# EAGLE library part PCIE-036-02-F-D-TH (library madhu)
Check availability <https://pricing.snapeda.com/parts/PCIE03602FDTH/Samtec/view-part?ref=eda>
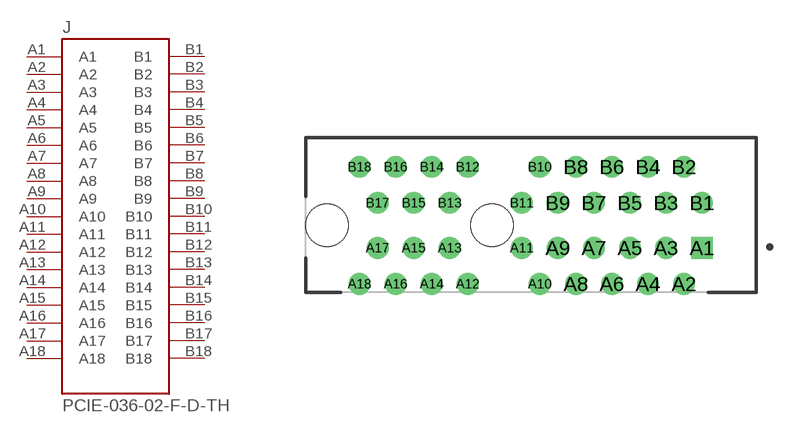
[diagram p51: symbol with the pads of SAMTEC_PCIE-036-02-F-D-TH; footprint SAMTEC_PCIE-036-02-F-D-TH]

Designator prefix J

## PCIE-036-02-F-D-TH (AVAILABILITY: In Stock; CHECK_PRICES: https://www.snapeda.com/parts/PCIE03602FDTH/Samtec/view-part/?ref=eda; DESCRIPTION: CARD EDGE CONN, DUAL SIDE, 36POS, TH; Product Range:PCIE Series; No. of Contacts:36Contacts; Card Edge / Backplane Connector Type:Card Edge; Pitch Spacing:1mm; Gender:Receptacle; Contact Termination Type:Through Hole; No. of Rows:2Rows; Row Pitch:-; Contact Material:Phosphor Bronze; Contact Plating:Gold Plated Contacts; SVHC:No SVHC (15-Jan-2018); Connector Type:Card Edge; Contact Termination:Through Hole Vertical; Lead Spacing:1mm; Operating Temperature Max:125°C; Operating Temperature Min:-55°C; Termination Method:Solder; MF: Samtec; MP: PCIE03602FDTH; PACKAGE: None; PRICE: None; SNAPEDA_LINK: https://www.snapeda.com/parts/PCIE03602FDTH/Samtec/view-part/?ref=snap)  [SAMTEC_PCIE-036-02-F-D-TH]
A1  A1  pas
A2  A2  pas
A3  A3  pas
A4  A4  pas
A5  A5  pas
A6  A6  pas
A7  A7  pas
A8  A8  pas
A9  A9  pas
A10  A10  pas
A11  A11  pas
A12  A12  pas
A13  A13  pas
A14  A14  pas
A15  A15  pas
A16  A16  pas
A17  A17  pas
A18  A18  pas
B1  B1  pas
B2  B2  pas
B3  B3  pas
B4  B4  pas
B5  B5  pas
B6  B6  pas
B7  B7  pas
B8  B8  pas
B9  B9  pas
B10  B10  pas
B11  B11  pas
B12  B12  pas
B13  B13  pas
B14  B14  pas
B15  B15  pas
B16  B16  pas
B17  B17  pas
B18  B18  pas

## Footprint SAMTEC_PCIE-036-02-F-D-TH (pad centres in mm)
drill 0.7 square: A1 9.5,-1.835
drill 0.7: A2 8.5,-3.835; A3 7.5,-1.835; A4 6.5,-3.835; A5 5.5,-1.835; A6 4.5,-3.835; A7 3.5,-1.835; A8 2.5,-3.835; A9 1.5,-1.835; A10 0.5,-3.835; A11 -0.5,-1.835; A12 -3.5,-3.835; A13 -4.5,-1.835; A14 -5.5,-3.835; A15 -6.5,-1.835; A16 -7.5,-3.835; A17 -8.5,-1.835; A18 -9.5,-3.835; B1 9.5,0.665; B2 8.5,2.665; B3 7.5,0.665; B4 6.5,2.665; B5 5.5,0.665; B6 4.5,2.665; B7 3.5,0.665; B8 2.5,2.665; B9 1.5,0.665; B10 0.5,2.665; B11 -0.5,0.665; B12 -3.5,2.665; B13 -4.5,0.665; B14 -5.5,2.665; B15 -6.5,0.665; B16 -7.5,2.665; B17 -8.5,0.665; B18 -9.5,2.665
hole 2.35 at -2.15,-0.585
hole 2.35 at -11.3,-0.585